# Altium integrated library PZHT0402-0R00GPT.IntLib: 1 symbol
Pins are listed as number, name and electrical type; pins without a type are passive.

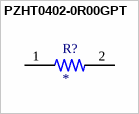
[diagram p0: symbol PZHT0402-0R00GPT]

## PZHT0402-0R00GPT
designator R?
PZHT Series 0402 0 O Jumper Surface Mount Surface Mount Thin Film Chip Resistor; MP: PZHT0402-0R00GPT; Package: None; Price: None; Value: *; Availability: Unavailable
footprint RESC1005X40
pins: 1, 2